# Altium schematic symbol library Tantalum_Capacitor_2917_D_E.SchLib: 2 symbols
Pins are listed as number, name and electrical type; pins without a type are passive.

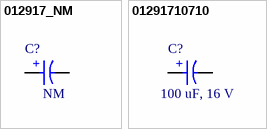
[diagram p0: symbols 012917_NM to 01291710710]

## 012917_NM
designator C?, comment NM
CAP TANT NM 2917; ComponentLink1Description: Datasheet; ComponentLink1URL: N/A; Capacitance: N/A; Supplier 1 URL: N/A; Supplier 2 URL: N/A; Supplier 3 URL: N/A; Value: NM; Rated Voltage: N/A; LCSC Part #: N/A; Manufacturer Part Number: N/A; Manufacturer: N/A; Mount: SMD/SMT; Operating Temperature Max: + 125 C; Operating Temperature Min: - 55 C; Package / Case: 2917; Packaging: Tape and Reel; Supplier 1 Part Number: N/A; Supplier 1: Mouser; Supplier 2 Part Number: N/A; Supplier 2: Digi-Key; Supplier 3 Part Number: N/A; Supplier 3: thegioiic; Tolerance: N/A; ESR: N/A; Leakage Current: N/A
footprint 2917_D (Molded Capacitor, 2-Leads, Body 7.30x4.35mm, IPC Medium Density)
pins: 1 P, 2 N
text: +

## 01291710710
designator C?, comment 100 uF, 16 V
CAP TANT 100uF ±10% 16V CASE-D-7343; Manufacturer Part Number: TAJA106K016RNJ; Manufacturer: Kyocera AVX; Rated Voltage: 16 VDC; Tolerance: +/-10%; ESR: 600 mOhms; Leakage Current: 16 uA; ComponentLink1Description: Datasheet; ComponentLink1URL: https://datasheets.kyocera-avx.com/TAJ.pdf; Capacitance: 100 uF; Supplier 1 URL: https://www.mouser.vn/en/ProductDetail/KYOCERA-AVX/TAJD107K016RNJ?qs=srZBJ3srS4Aek4oWmPB2bw%3D%3D; Supplier 2 URL: https://www.digikey.com/en/products/detail/kyocera-avx/TAJD107K016RNJ/563828?s=N4IgTCBcDaICoEEBSARAjABgOwGkNoDYAlAOSRAF0BfIA; Supplier 3 URL: N/A; Value: 100 uF; LCSC Part #: C7171; Mount: SMD/SMT; Operating Temperature Max: + 125 C; Operating Temperature Min: - 55 C; Package / Case: 2917; Packaging: Tape and Reel; Supplier 1 Part Number: 581-TAJD107K016R; Supplier 1: Mouser; Supplier 2 Part Number: 478-1723-2-ND; Supplier 2: Digi-Key; Supplier 3 Part Number: N/A; Supplier 3: thegioiic
footprint 2917_D (Molded Capacitor, 2-Leads, Body 7.30x4.35mm, IPC Medium Density)
pins: 1 P, 2 N
text: +